# Altium schematic symbol library R_34K8.SchLib: 1 symbol
Pins are listed as number, name and electrical type; pins without a type are passive.

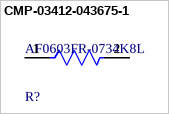
[diagram p0: symbol CMP-03412-043675-1]

## CMP-03412-043675-1
designator R?, comment AF0603FR-0734K8L
Anti-Sulfurated Chip Resistors Automotive Grade 34.8kΩ 1% 100ppm/°C 0603; Max Power Dissipation: 100mW; Resistance: 34.8kR; Number of Terminations: 2; Packaging: Tape and Reel; Height: 0.022inch; Temperature Coefficient: 100ppm/°C; Case/Package: 0603; Tolerance: 1%; Resistor Type: Thick Film; Series: AF; Min Operating Temperature: -55°C; RoHS Compliant: Yes; Features: Moisture Resistant; Width: 0.031inch; Max Operating Temperature: 155°C; Length: 0.063inch
footprint FP-AF0603-IPC_A
footprint FP-AF0603-IPC_B
footprint FP-AF0603-IPC_C
footprint FP-AF0603-MFG
pins: 1, 2